# EAGLE library part 6103XX243021_610310243021 (library WR-PHD)
WR-PHD 2.54 mm SMT Dual Socket Header Bottom Entry ARTICLE PROPERTIES: Pins:4;​ 6;​ 8;​ 10;​ 12;​ 16;​ 18;​ 20;​ 22;​ 24;​ 26;​ 32;​ 34 KIND PROPERTIES: Pitch：2.54 mm Quality Class:3 as per CECC 75 301-802 Rows：Dual Gender：Socket Header Type：Bottom Entry Large MATERIAL PROPERTIES: Insulator Material PA9T Insulator Flammability Rating:UL94 V-0 Contact Material:Copper Alloy Contact Plating:Gold Contact Type:Stamped GENERAL INFORMATION Operating Temperature:-40 up to +125 °C Compliance:Lead free / RoHS ELECTRICAL PROPERTIES: Rated Current:3 A IR 1:3 A Withstanding Voltage:500 V (AC) Contact Resistance:20 mΩ RISO:1000 MΩ CERTIFICATION UL Approval:E323964 PACKAGING PROPERTIES Packaging:Tube <https://www.we-online.com/catalog/media/o33207v209%20Family_WR-PHD_610xxx243021.jpg> Details see: https://www.we-online.com/catalog/en/PHD_2_54_SMT_DUAL_SOCKET_HEADER_BOTTOM_ENTRY_6100XX243021 Updated by Ella Wu 2022-12-06 2022 (C) Würth Elektronik
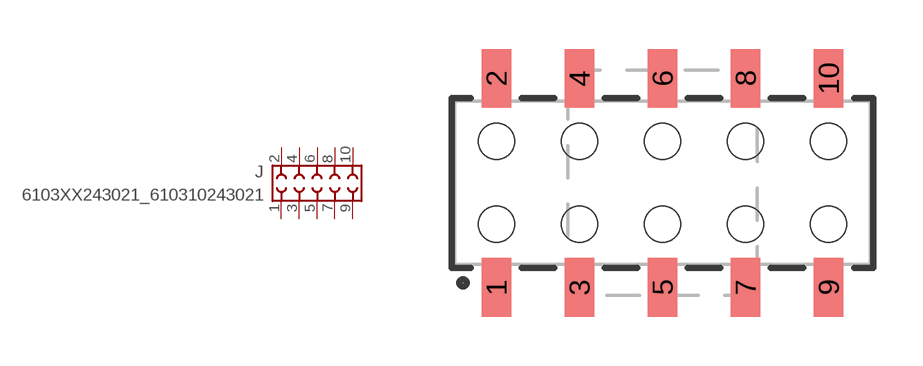
[diagram p209: symbol with the pads of 610310243021; footprint 610310243021]

Designator prefix J

## 6103XX243021_610310243021 (DATASHEET-URL: https://www.we-online.com/redexpert/spec/610310243021?ae; GENDER: Socket Header; IR: 3A; MOUNT: SMT; PACKAGING: Tape and Reel with Cap; PART-NUMBER: 610310243021; PINS: 10; PITCH: 2.54 mm; ROWS: Dual; TYPE: Bottom Entry Low Profile; VALUE: 610310243021)  [610310243021]
1  1  pas
2  2  pas
3  3  pas
4  4  pas
5  5  pas
6  6  pas
7  7  pas
8  8  pas
9  9  pas
10  10  pas

## Footprint 610310243021 (pad centres in mm)
WR-PHD 2.54 mm SMT Dual Socket Header Bottom Entry (Reel), 10Pins
smd 0.9 x 1.8: 1 -5.08,-3.2; 2 -5.08,3.2; 3 -2.54,-3.2; 4 -2.54,3.2; 5 0,-3.2; 6 0,3.2; 7 2.54,-3.2; 8 2.54,3.2; 9 5.08,-3.2; 10 5.08,3.2
hole 1.1 at -5.08,1.27
hole 1.1 at -2.54,1.27
hole 1.1 at -2.54,-1.27
hole 1.1 at -5.08,-1.27
hole 1.1 at 0,1.27
hole 1.1 at 0,-1.27
hole 1.1 at 2.54,1.27
hole 1.1 at 2.54,-1.27
hole 1.1 at 5.08,-1.27
hole 1.1 at 5.08,1.27